# Altium footprint library HFPB_01-PCBLib.PcbLib: 102 footprints (part 2 of 7)
Each footprint in its own frame and in the unit in brackets; x right, y up, seen from the top. Pads: shape width x height; smd on the part's side, far side on the other; paste and mask are expansions set on the pad; w line width, h text height; cw(c..) or ccw(c..) is an arc to the next point about the centre after c.
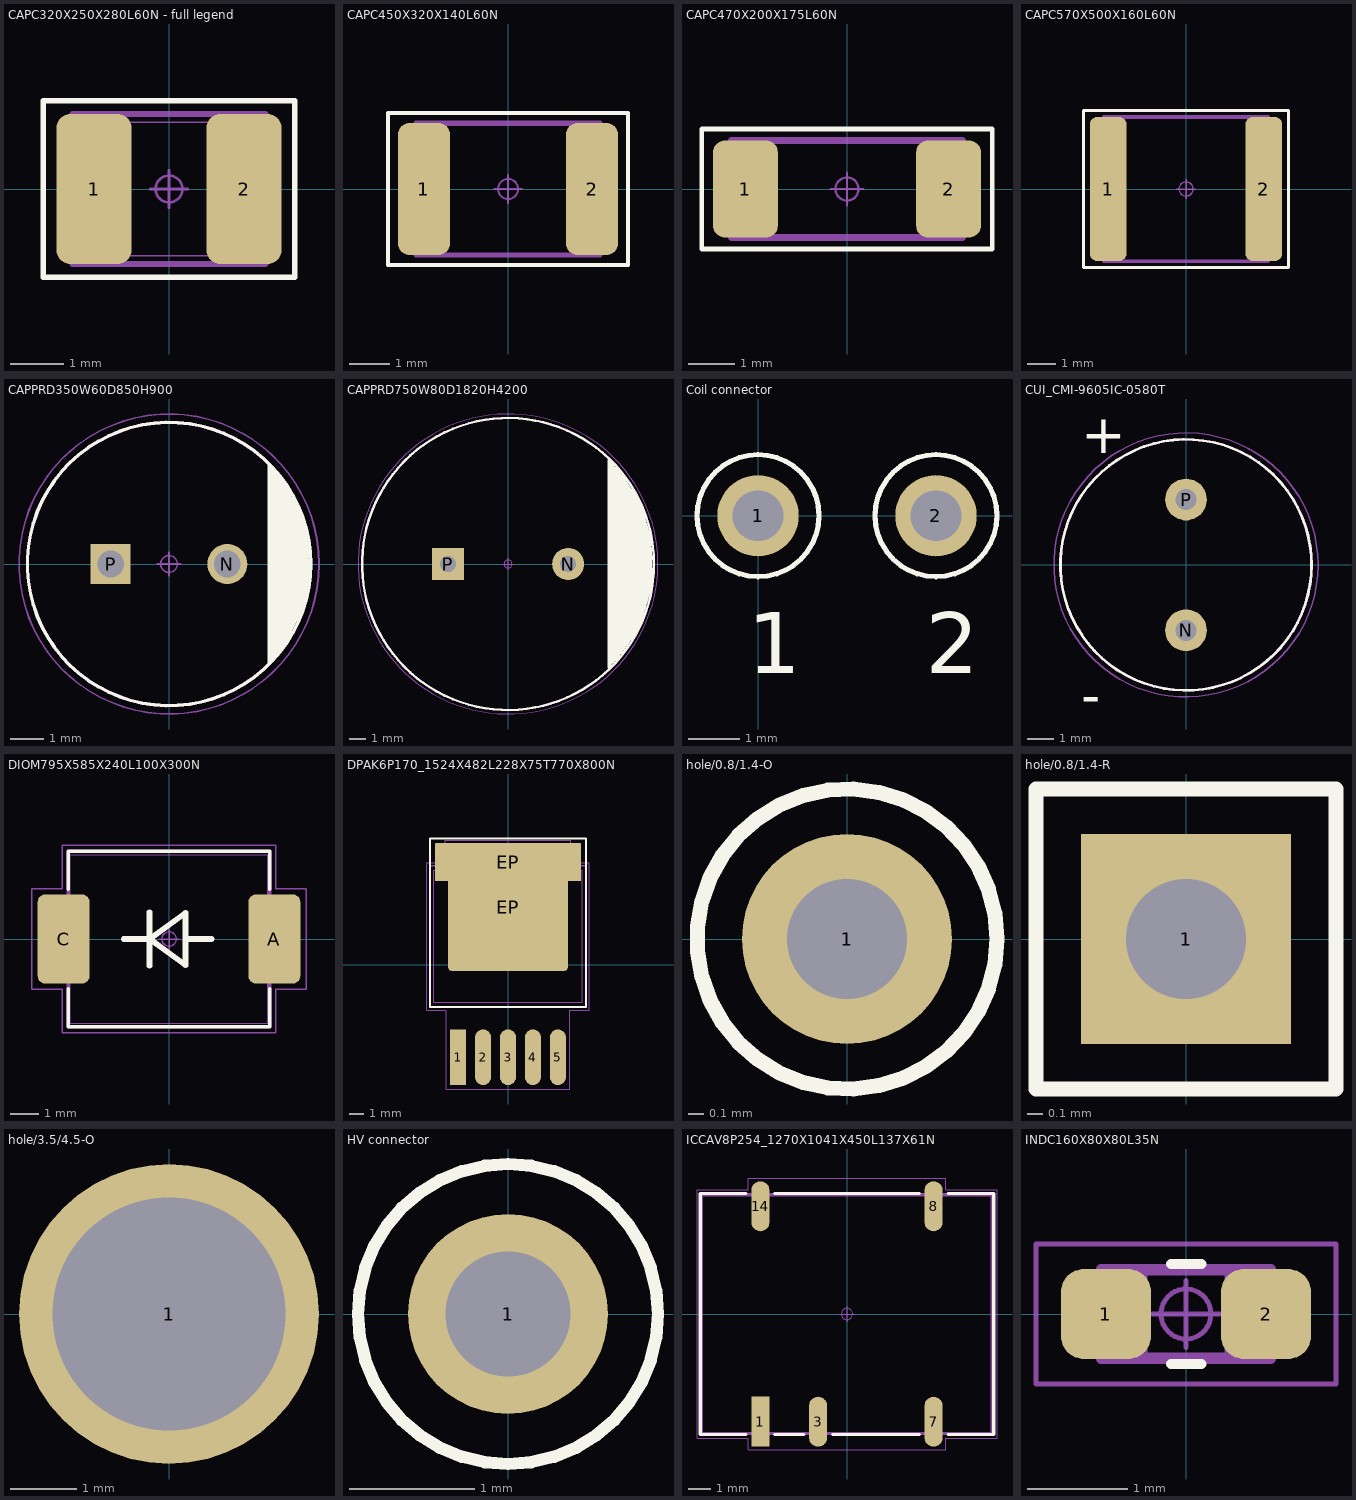
[diagram p1: the footprints below, top view; thin cyan lines are the x and y axes]

## CAPC320X250X280L60N - full legend [mm] "Capacitor, Chip; 3.20 mm L X 2.50 mm W X 2.80 mm H body"
height 2.8
pads (2):
  rrect36% 1.4x2.8 smd: 1(-1.4,0) 2(1.4,0)
Top Overlay:
  lines w0.1: -2.35,-1.65 -2.35,1.65 2.35,1.65 2.35,-1.65 -2.35,-1.65
Mechanical 11:
  lines w0.12: -1.8,-1.4 -1.8,1.4 1.8,1.4 1.8,-1.4 -1.8,-1.4
Mechanical 12:
  lines w0.025: -1.6,-1.25 -1,-1.25 -1,1.25 -1.6,1.25 ; -1.6,-1.25 -1.6,1.25 ; -1.6,-1.25 -1.6,1.25 ; -1.6,-1.25 1.6,-1.25 ; -1.6,1.25 1.6,1.25 ; 1.6,-1.25 1.6,1.25 ; 1.6,-1.25 1,-1.25 1,1.25 1.6,1.25 ; 1.6,-1.25 1.6,1.25
Mechanical 15:
  circle w0.05: c0,0 r0.25
  lines w0.05: -0.35,0 0.35,0 ; 0,-0.35 0,0.35 ; -2.35,-1.65 -2.35,1.65 2.35,1.65 2.35,-1.65 -2.35,-1.65
Mechanical 16:
  text ".Designator" at 0,0 h1.2
3D body "CAPC320X250X280L60.STEP": height 2.8, standoff 0, extent -1.6,-1.25 1.6,1.25

## CAPC450X320X140L60N [mm] "Capacitor, Chip; 4.50 mm L X 3.20 mm W X 1.40 mm H body"
height 1.4
pads (2):
  rrect43% 1.3x3.3 smd: 1(-2.1,0) 2(2.1,0)
Top Overlay:
  lines w0.1: -3,-1.9 3,-1.9 3,1.9 -3,1.9 -3,-1.9
Mechanical 11:
  lines w0.12: -2.3,-1.65 -2.3,1.65 2.3,1.65 2.3,-1.65 -2.3,-1.65
Mechanical 12:
  lines w0.025: -2.25,-1.6 -1.65,-1.6 -1.65,1.6 -2.25,1.6 ; -2.25,-1.6 -2.25,1.6 ; -2.25,-1.6 -2.25,1.6 ; -2.25,-1.6 2.25,-1.6 ; -2.25,1.6 2.25,1.6 ; 2.25,-1.6 2.25,1.6 ; 2.25,-1.6 1.65,-1.6 1.65,1.6 2.25,1.6 ; 2.25,-1.6 2.25,1.6
Mechanical 15:
  circle w0.05: c0,0 r0.25
  lines w0.05: -0.35,0 0.35,0 ; 0,-0.35 0,0.35 ; -3,-1.9 -3,1.9 3,1.9 3,-1.9 -3,-1.9
Mechanical 16:
  text ".Designator" at 0,0 h1.2
3D body "CAPC450X320X140L60.STEP": height 1.4, standoff 0, extent -2.25,-1.6 2.25,1.6

## CAPC470X200X175L60N [mm] "Capacitor, Chip; 4.70 mm L X 2.00 mm W X 1.75 mm H body"
height 1.75
pads (2):
  rrect35% 1.4x2.1 smd: 1(-2.2,0) 2(2.2,0)
Top Overlay:
  lines w0.1: -3.15,-1.3 -3.15,1.3 3.15,1.3 3.15,-1.3 -3.15,-1.3
Mechanical 11:
  lines w0.15: -2.5,-1.05 2.5,-1.05 2.5,1.05 -2.5,1.05 -2.5,-1.05
Mechanical 12:
  lines w0.025: -2.35,-1 2.35,-1 ; -2.35,-1 -2.35,1 ; -2.35,-1 -2.35,1 ; -2.35,-1 -1.75,-1 -1.75,1 -2.35,1 ; -2.35,1 2.35,1 ; 2.35,-1 2.35,1 ; 2.35,-1 1.75,-1 1.75,1 2.35,1 ; 2.35,-1 2.35,1
Mechanical 15:
  circle w0.05: c0,0 r0.25
  lines w0.05: -0.35,0 0.35,0 ; 0,-0.35 0,0.35 ; -3.15,-1.3 3.15,-1.3 3.15,1.3 -3.15,1.3 -3.15,-1.3
Mechanical 16:
  text ".Designator" at 0,0 h1.2
3D body "CAPC470X200X175L60.STEP": height 1.75, standoff 0, extent -2.35,-1 2.35,1

## CAPC570X500X160L60N [mm] "Capacitor, Chip; 5.70 mm L X 5.00 mm W X 1.60 mm H body"
height 1.6
pads (2):
  rrect40% 1.3x5.1 smd: 1(-2.75,0) 2(2.75,0)
Top Overlay:
  lines w0.1: -3.625,-2.775 -3.625,2.775 3.625,2.775 3.625,-2.775 -3.625,-2.775
Mechanical 11:
  lines w0.12: -2.9,-2.55 -2.9,2.55 2.9,2.55 2.9,-2.55 -2.9,-2.55
Mechanical 12:
  lines w0.025: -2.85,-2.5 -2.25,-2.5 -2.25,2.5 -2.85,2.5 ; -2.85,-2.5 -2.85,2.5 ; -2.85,-2.5 -2.85,2.5 ; -2.85,-2.5 2.85,-2.5 ; -2.85,2.5 2.85,2.5 ; 2.85,-2.5 2.85,2.5 ; 2.85,-2.5 2.25,-2.5 2.25,2.5 2.85,2.5 ; 2.85,-2.5 2.85,2.5
Mechanical 15:
  circle w0.05: c0,0 r0.25
  lines w0.05: -0.35,0 0.35,0 ; 0,-0.35 0,0.35 ; -3.62,-2.77 -3.62,2.77 3.62,2.77 3.62,-2.77 -3.62,-2.77
Mechanical 16:
  text ".Designator" at 0,0 h1.2
3D body "CAPC570X500X160L60.STEP": height 1.6, standoff 0, extent -2.85,-2.5 2.85,2.5

## CAPPRD350W60D850H900 [mm] "Capacitor, Polarized, Radial (Electrolytic); 3.50 mm C X 8.50 mm Dia X 9.00 mm H body"
height 9
pads (2):
  round 1.2 hole 0.8 paste-1.2: N(1.75,0)
  rect 1.2x1.2 hole 0.8 paste-1.2: P(-1.75,0)
Top Overlay:
  circle w0.1: c0,0 r4.25
  lines w0.1: 3,-3 3,2.975
  lines w0.25: 3.075,-2.8 3.075,2.775 ; 3.25,-2.625 3.25,2.6 ; 3.4,-2.425 3.4,2.425
  lines w0.254: 3.408,-2.239 ccw(c0,0) 3.412,2.233 ; 3.428,-1.495 ccw(c0,0) 3.468,1.397 ; 3.436,-1.743 ccw(c0,0) 3.466,1.683 ; 3.44,-0.847 ccw(c0,0) 3.443,0.836
Mechanical 11:
  circle w0.1: c0,0 r4.25
Mechanical 12:
  circle w0.025: c-1.75,0 r0.3
  circle w0.025: c1.75,0 r0.3
  circle w0.025: c0,0 r4.25
Mechanical 15:
  circle w0.05: c0,0 r4.5
  circle w0.05: c0,0 r0.25
  lines w0.05: -0.35,0 0.35,0 ; 0,-0.35 0,0.35
Mechanical 16:
  text ".Designator" at 0,0 h1.2
3D body "CAPPRD350W60D850H900.STEP": height 9.01, standoff -2, extent -4.25,-4.25 4.26,4.25

## CAPPRD750W80D1820H4200 [mm] "Capacitor, Polarized, Radial (Electrolytic); 7.50 mm C X 18.20 mm Dia X 42.00 mm H body"
height 42
pads (2):
  round 2 hole 1 paste-1.58: N(3.75,0)
  rect 2x2 hole 1 paste-1.58: P(-3.75,0)
Top Overlay:
  circle w0.15: c0,0 r9.1
  lines w0.25: 6.325,-6.425 6.325,6.45 ; 6.356,6.23 cw(c0,0) 6.37,-6.215 ; 6.377,4.663 cw(c0,0) 6.401,-4.63 ; 6.417,-5.264 ccw(c0,0) 6.418,5.263 ; 6.423,-5.567 ccw(c0,0) 6.432,5.556 ; 6.426,-4.931 ccw(c0,0) 6.447,4.904 ; 6.435,-5.855 ccw(c0,0) 6.435,5.855
  lines w2: 7.2,-3.75 7.2,3.675
Mechanical 11:
  circle w0.12: c0,0 r9.1
Mechanical 12:
  circle w0.025: c-3.75,0 r0.425
  circle w0.025: c3.75,0 r0.425
  circle w0.025: c0,0 r9.1
Mechanical 15:
  circle w0.05: c0,0 r9.35
  circle w0.05: c0,0 r0.25
  lines w0.05: -0.35,0 0.35,0 ; 0,-0.35 0,0.35
Mechanical 16:
  text ".Designator" at 0,0 h1.2
3D body "CAPPRD750W80D1820H4200.STEP": height 42.01, standoff -2, extent -9.1,-9.1 9.11,9.1

## Coil connector [mm] "holes round 4.0/0.8/1.4"
pads (2):
  round 1.6 hole 1 paste-1.4: 1(0,0) 2(3.5,0)
Top Overlay:
  circle w0.1: c3.5,0 r1.2
  circle w0.1: c0,0 r1.2
  text "1" at -0.2,-3.1 h1.2
  text "2" at 3.3,-3.1 h1.2
Mechanical 12:
  lines w0.025: -0.28,-0.15 0.28,-0.15 0.28,0.15 -0.28,0.15 -0.28,-0.15
Mechanical 15:
  circle w0.05: c0,0 r0.25
  lines w0.05: -0.35,0 0.35,0 ; 0,-0.35 0,0.35
Mechanical 16:
  text ".Designator" at -0.8,1.3 h1.2

## CUI_CMI-9605IC-0580T [mm]
height 5
pads (2):
  round 1.6 hole 0.8: N(0,-2.5) P(0,2.5)
Top Overlay:
  circle w0.1: c0,0 r4.8
  text "+" at -4,4.27 h1.5
  text "-" at -4,-5.7 h1.5
Mechanical 13:
  circle w0.1: c0,0 r4.8
  text "+" at -4,4.27 h1.5
  text "-" at -4,-5.7 h1.5
Mechanical 15:
  circle w0.05: c0,0 r5.05
3D body "CUI_DEVICES_CMI-9605IC-0580T.step": height 5.1, standoff -5.4, extent -4.8,-4.8 4.8,4.8

## DIOM795X585X240L100X300N [mm] "Diode, Molded Body; 6.85 mm L X 5.85 mm W X 2.40 mm H body"
height 2.4
pads (2):
  rrect28% 1.8x3.1 smd: A(3.66,0) C(-3.66,0)
Top Overlay:
  lines w0.12: -3.5,-1.73 -3.5,-3.05 3.5,-3.05 3.5,-1.73 ; -3.5,1.73 -3.5,3.05 3.5,3.05 3.5,1.73
  lines w0.2: -1.575,0 -0.675,0 ; -0.675,-0.925 -0.675,0.925 ; 0.575,0 1.475,0 ; -0.675,0 0.575,0.909 0.575,-0.909 -0.675,0
Mechanical 11:
  lines w0.12: -3.5,-3.05 -3.5,3.05 3.5,3.05 3.5,-3.05 -3.5,-3.05
Mechanical 12:
  lines w0.025: -3.975,-1.5 -2.975,-1.5 -2.975,1.5 -3.975,1.5 -3.975,-1.5 ; -3.425,-2.925 -3.425,2.925 3.425,2.925 3.425,-2.925 -3.425,-2.925 ; 2.975,-1.5 2.975,1.5 3.975,1.5 3.975,-1.5 2.975,-1.5
Mechanical 15:
  circle w0.05: c0,0 r0.25
  lines w0.05: -0.35,0 0.35,0 ; 0,-0.35 0,0.35 ; -4.76,-1.75 -4.76,1.75 -3.7,1.75 -3.7,3.25 3.7,3.25 3.7,1.75 4.76,1.75 4.76,-1.75 3.7,-1.75 3.7,-3.25 -3.7,-3.25 -3.7,-1.75 -4.76,-1.75
Mechanical 16:
  text ".Designator" at 0,0 h1.2
3D body "DIOM795X585X240L100X300.STEP": height 2.4, standoff 0, extent -3.975,-2.925 3.975,2.925

## DPAK6P170_1524X482L228X75T770X800N [mm] "DPAK, 1.702 mm pitch; 5 pin, 9.017 mm L X 10.16 mm W X 4.82 mm H body"
height 4.82
pads (7):
  rect 1.1x3.8 smd: 1(-3.404,-6.32)
  oval 1.1x3.8 smd: 2(-1.702,-6.32) 3(0,-6.32) 4(1.702,-6.32) 5(3.404,-6.32)
  rrect6% 8.17x8.72 smd paste-8.72: EP(0,3.93)
  rrect6% 10x2.6 smd paste-8.72: EP(0,7)
Top Overlay:
  lines w0.15: -5.325,-2.896 5.325,-2.896 5.325,8.625 -5.325,8.625 -5.325,-2.896
Top Paste:
  region: 3.76,-0.165 2.36,-0.165 2.36,1.065 3.76,1.065
  region: 3.76,1.575 2.36,1.575 2.36,2.805 3.76,2.805
  region: 3.76,3.315 2.36,3.315 2.36,4.545 3.76,4.545
  region: 3.76,5.055 2.36,5.055 2.36,6.285 3.76,6.285
  region: 3.76,6.795 2.36,6.795 2.36,8.025 3.76,8.025
  region: 1.72,-0.165 0.32,-0.165 0.32,1.065 1.72,1.065
  region: 1.72,1.575 0.32,1.575 0.32,2.805 1.72,2.805
  region: 1.72,3.315 0.32,3.315 0.32,4.545 1.72,4.545
  region: 1.72,5.055 0.32,5.055 0.32,6.285 1.72,6.285
  region: 1.72,6.795 0.32,6.795 0.32,8.025 1.72,8.025
  region: -0.32,-0.165 -1.72,-0.165 -1.72,1.065 -0.32,1.065
  region: -0.32,1.575 -1.72,1.575 -1.72,2.805 -0.32,2.805
  region: -0.32,3.315 -1.72,3.315 -1.72,4.545 -0.32,4.545
  region: -0.32,5.055 -1.72,5.055 -1.72,6.285 -0.32,6.285
  region: -0.32,6.795 -1.72,6.795 -1.72,8.025 -0.32,8.025
  region: -2.36,-0.165 -3.76,-0.165 -3.76,1.065 -2.36,1.065
  region: -2.36,1.575 -3.76,1.575 -3.76,2.805 -2.36,2.805
  region: -2.36,3.315 -3.76,3.315 -3.76,4.545 -2.36,4.545
  region: -2.36,5.055 -3.76,5.055 -3.76,6.285 -2.36,6.285
  region: -2.36,6.795 -3.76,6.795 -3.76,8.025 -2.36,8.025
Mechanical 11:
  lines w0.12: -5.33,-2.896 5.33,-2.896 5.33,6.763 -5.33,6.763 -5.33,-2.896
Mechanical 12:
  lines w0.025: -5.08,-2.575 -5.08,6.442 5.08,6.442 5.08,-2.575 -5.08,-2.575 ; -4,-0.08 4,-0.08 4,7.62 -4,7.62 -4,-0.08 ; -3.779,-7.62 -3.029,-7.62 -3.029,-5.334 -3.779,-5.334 -3.779,-7.62 ; -2.077,-7.62 -1.327,-7.62 -1.327,-5.334 -2.077,-5.334 -2.077,-7.62 ; -0.375,-7.62 0.375,-7.62 0.375,-5.334 -0.375,-5.334 -0.375,-7.62 ; 1.327,-7.62 2.077,-7.62 2.077,-5.334 1.327,-5.334 1.327,-7.62 ; 3.029,-7.62 3.779,-7.62 3.779,-5.334 3.029,-5.334 3.029,-7.62
Mechanical 15:
  circle w0.05: c0,0 r0.25
  lines w0.05: -0.35,0 0.35,0 ; 0,-0.35 0,0.35 ; -5.54,-3.1 -5.54,6.96 -4.285,6.96 -4.285,8.49 4.285,8.49 4.285,6.96 5.54,6.96 5.54,-3.1 4.204,-3.1 4.204,-8.49 -4.204,-8.49 -4.204,-3.1 -5.54,-3.1
Mechanical 16:
  text ".Designator" at 0,0 h1.2
3D body "TO263-5-1.stp": height 4.22, standoff 0, extent -4.936,-7.286 4.886,7.316

## hole/0.8/1.4-O [mm] "hole round 0.8/1.4"
pads (1):
  round 1.4 hole 0.8 paste-1.4: 1(0,0)
Top Overlay:
  circle w0.1: c0,0 r1
Mechanical 12:
  lines w0.025: -0.28,-0.15 0.28,-0.15 0.28,0.15 -0.28,0.15 -0.28,-0.15
Mechanical 15:
  circle w0.05: c0,0 r0.25
  lines w0.05: -0.35,0 0.35,0 ; 0,-0.35 0,0.35
Mechanical 16:
  text ".Designator" at -0.8,1.3 h1.2

## hole/0.8/1.4-R [mm] "hole rect 0.8/1.4"
pads (1):
  rect 1.4x1.4 hole 0.8 paste-1.4: 1(0,0)
Top Overlay:
  lines w0.1: -1,-1 0.975,-1 1,-1 1,1 -1,1 -1,-1
Mechanical 12:
  lines w0.025: -0.28,-0.15 0.28,-0.15 0.28,0.15 -0.28,0.15 -0.28,-0.15
Mechanical 15:
  circle w0.05: c0,0 r0.25
  lines w0.05: -0.35,0 0.35,0 ; 0,-0.35 0,0.35
Mechanical 16:
  text ".Designator" at -0.8,1.3 h1.2

## hole/3.5/4.5-O [mm] "hole round 3.5/4.5"
pads (1):
  round 4.5 hole 3.5 paste-1.4: 1(0,0)
Mechanical 12:
  lines w0.025: -0.28,-0.15 -0.28,0.15 0.28,0.15 0.28,-0.15 -0.28,-0.15
Mechanical 15:
  circle w0.05: c0,0 r0.25
  lines w0.05: -0.35,0 0.35,0 ; 0,-0.35 0,0.35
Mechanical 16:
  text ".Designator" at -0.35,2.75 h1.2

## HV connector [mm] "holes round 0.8/1.4"
pads (1):
  round 1.6 hole 1 paste-1.4: 1(0,0)
Top Overlay:
  circle w0.1: c0,0 r1.2
Mechanical 12:
  lines w0.025: -0.28,-0.15 0.28,-0.15 0.28,0.15 -0.28,0.15 -0.28,-0.15
Mechanical 15:
  circle w0.05: c0,0 r0.25
  lines w0.05: -0.35,0 0.35,0 ; 0,-0.35 0,0.35
Mechanical 16:
  text ".Designator" at -0.8,1.3 h1.2

## ICCAV8P254_1270X1041X450L137X61N [mm] "Chip Array, 2 Side Concave, 2.54 mm pitch; 8 pin, 12.70 mm L X 10.41 mm W X 4.50 mm H body"
height 4.5
pads (5):
  rect 0.8x2.2 smd: 1(-3.81,-4.74)
  oval 0.8x2.2 smd: 3(-1.27,-4.74) 7(3.81,-4.74) 8(3.81,4.74) 14(-3.81,4.74)
Top Overlay:
  lines w0.15: -4.45,-5.3 -6.45,-5.3 -6.45,5.3 -4.45,5.3 ; -3.175,-5.3 -1.9,-5.3 ; -3.175,5.3 3.175,5.3 ; -0.625,-5.3 3.175,-5.3 ; 4.45,-5.3 6.45,-5.3 6.45,5.3 4.45,5.3
Mechanical 11:
  lines w0.12: -6.4,-5.26 6.4,-5.26 6.4,5.26 -6.4,5.26 -6.4,-5.26
Mechanical 12:
  lines w0.025: -6.35,-5.205 6.35,-5.205 6.35,5.205 -6.35,5.205 -6.35,-5.205 ; -4.115,-5.205 -4.115,-3.835 -3.505,-3.835 -3.505,-5.205 -4.115,-5.205 ; -4.115,3.835 -4.115,5.205 -3.505,5.205 -3.505,3.835 -4.115,3.835 ; -1.575,-5.205 -1.575,-3.835 -0.965,-3.835 -0.965,-5.205 -1.575,-5.205 ; 3.505,-5.205 3.505,-3.835 4.115,-3.835 4.115,-5.205 3.505,-5.205 ; 3.505,3.835 3.505,5.205 4.115,5.205 4.115,3.835 3.505,3.835
Mechanical 15:
  circle w0.05: c0,0 r0.25
  lines w0.05: -0.35,0 0.35,0 ; 0,-0.35 0,0.35 ; -6.6,-5.46 -4.345,-5.46 -4.345,-5.97 4.345,-5.97 4.345,-5.46 6.6,-5.46 6.6,5.46 4.345,5.46 4.345,5.97 -4.345,5.97 -4.345,5.46 -6.6,5.46 -6.6,-5.46
Mechanical 16:
  text ".Designator" at 0,0 h1.2
3D body "mps_dcdc_nxe2s_mc_a.step": height 4.41, standoff 0, extent -6.35,-5.207 6.35,5.207

## INDC160X80X80L35N [mm] "Inductor, Chip; 1.60 mm L X 0.80 mm W X 0.80 mm H body"
height 0.8
pads (2):
  rrect51% 0.9x0.9 smd: 1(-0.8,0.001) 2(0.8,0.001)
Top Overlay:
  lines w0.1: -0.15,-0.5 0.155,-0.5 ; -0.15,0.5 0.155,0.5
Mechanical 11:
  lines w0.1: -0.85,-0.449 0.85,-0.449 0.85,0.451 -0.85,0.451 -0.85,-0.449
Mechanical 12:
  lines w0.025: -0.8,-0.399 0.8,-0.399 ; -0.8,-0.399 -0.8,0.401 ; -0.8,-0.399 -0.8,0.401 ; -0.8,-0.399 -0.4,-0.399 -0.4,0.401 -0.8,0.401 ; -0.8,0.401 0.8,0.401 ; 0.8,-0.399 0.8,0.401 ; 0.8,-0.399 0.4,-0.399 0.4,0.401 0.8,0.401 ; 0.8,-0.399 0.8,0.401
Mechanical 15:
  circle w0.05: c0,0.001 r0.25
  lines w0.05: -0.335,0.001 0.335,0.001 ; 0,-0.334 0,0.336 ; -1.5,-0.699 1.5,-0.699 1.5,0.701 -1.5,0.701 -1.5,-0.699
Mechanical 16:
  text ".Designator" at -1.5,0.9 h1.2
3D body "INDC160X80X80L35.STEP": height 0.8, standoff 0, extent -0.8,-0.4 0.8,0.4